# Altium footprint library SamacSys.PcbLib: 1008 footprints (part 48 of 63)
Each footprint in its own frame and in the unit in brackets; x right, y up, seen from the top. Pads: shape width x height; smd on the part's side, far side on the other; paste and mask are expansions set on the pad; w line width, h text height; cw(c..) or ccw(c..) is an arc to the next point about the centre after c.
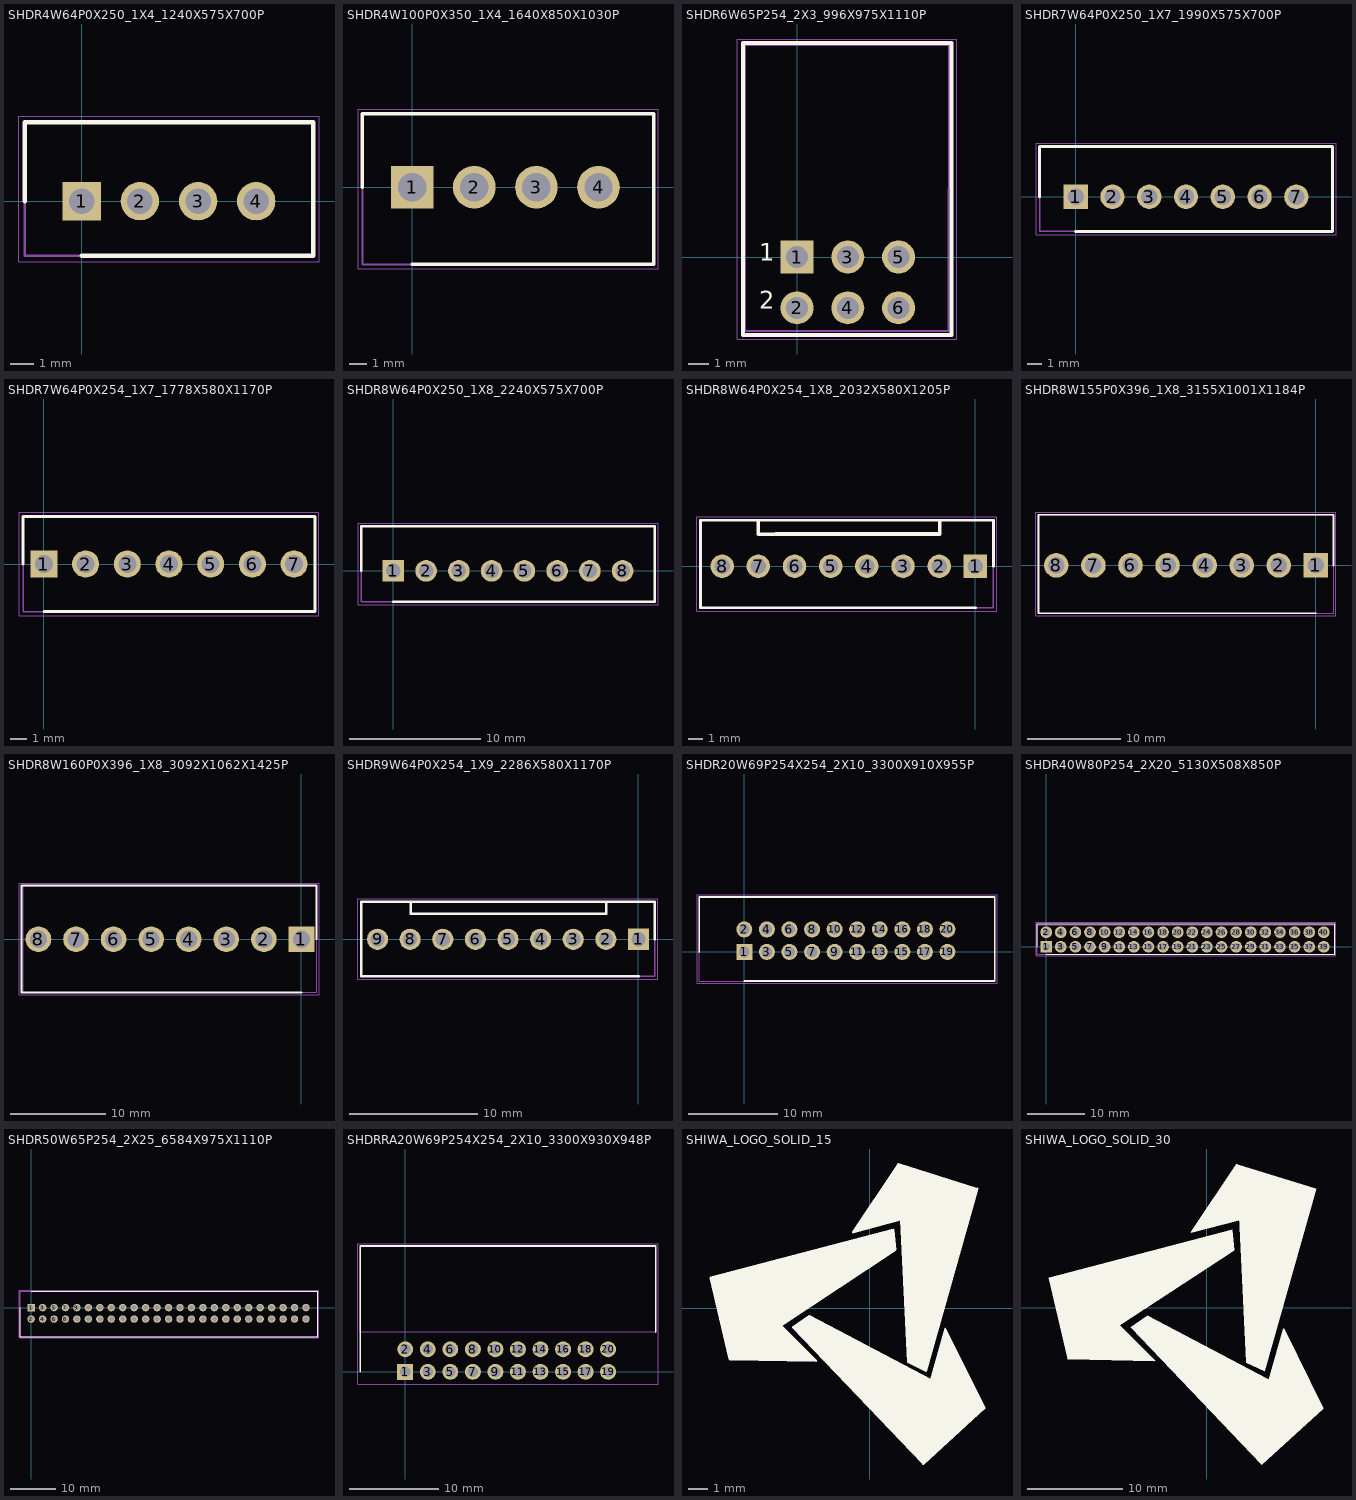
[diagram p47: the footprints below, top view; thin cyan lines are the x and y axes]

## SHDR4W64P0X250_1X4_1240X575X700P [mm]
pads (4):
  rect 1.65x1.65 hole 1.1: 1(0,0)
  round 1.65 hole 1.1: 2(2.5,0) 3(5,0) 4(7.5,0)
Top Overlay:
  lines w0.2: -2.45,0 -2.45,3.4 9.95,3.4 9.95,-2.35 0,-2.35
Assembly:
  lines w0.1: -2.45,-2.35 9.95,-2.35 9.95,3.4 -2.45,3.4 -2.45,-2.35
Countryard:
  lines w0.05: -2.7,-2.6 10.2,-2.6 10.2,3.65 -2.7,3.65 -2.7,-2.6
3D body "B4B-XH-A__LF__SN_.stp": height 7, standoff -3.4, extent -2.45,-2.875 9.95,2.875

## SHDR4W100P0X350_1X4_1640X850X1030P [mm]
pads (4):
  rect 2.4x2.4 hole 1.6: 1(0,0)
  round 2.4 hole 1.6: 2(3.5,0) 3(7,0) 4(10.5,0)
Top Overlay:
  lines w0.2: -2.8,0 -2.8,4.15 13.6,4.15 13.6,-4.35 0,-4.35
Assembly:
  lines w0.1: -2.8,-4.35 13.6,-4.35 13.6,4.15 -2.8,4.15 -2.8,-4.35
Countryard:
  lines w0.05: -3.05,-4.6 13.85,-4.6 13.85,4.4 -3.05,4.4 -3.05,-4.6
3D body "734-134.stp": height 10.3, standoff -4.5, extent -2.95,-4.25 13.45,4.25

## SHDR6W65P254_2X3_996X975X1110P [mm]
pads (6):
  rect 1.65x1.65 hole 1.1: 1(0,0)
  round 1.65 hole 1.1: 2(0,-2.54) 3(2.54,0) 4(2.54,-2.54) 5(5.08,0) 6(5.08,-2.54)
Top Overlay:
  lines w0.2: 7.7,10.7 -2.7,10.7 -2.7,-3.9 7.72,-3.9 7.72,10.7
  text "2" at -1.9,-2.9 h1.5
  text "1" at -1.9,-0.5 h1.5
Assembly:
  lines w0.1: 7.6,10.6 -2.6,10.6 -2.6,-3.7 7.567,-3.7 7.601,10.6
Countryard:
  lines w0.05: -3,-4.1 8,-4.1 8,10.9 -3,10.9 -3,-4.1
3D body "90130-3106.stp": height 9.75, standoff -2.9, extent -2.52,-2.893 7.44,10.51

## SHDR7W64P0X250_1X7_1990X575X700P [mm]
pads (7):
  rect 1.65x1.65 hole 1.1: 1(0,0)
  round 1.65 hole 1.1: 2(2.5,0) 3(5,0) 4(7.5,0) 5(10,0) 6(12.5,0) 7(15,0)
Top Overlay:
  lines w0.2: -2.45,0 -2.45,3.4 17.45,3.4 17.45,-2.35 0,-2.35
Assembly:
  lines w0.1: -2.45,-2.35 -2.45,3.4 17.45,3.4 17.45,-2.35 -2.45,-2.35
Countryard:
  lines w0.05: -2.7,-2.6 -2.7,3.65 17.7,3.65 17.7,-2.6 -2.7,-2.6
3D body "B7B-XH-A_LF__SN_.stp": height 7, standoff -3.4, extent -2.449,-2.349 17.451,3.401

## SHDR7W64P0X254_1X7_1778X580X1170P [mm]
pads (7):
  rect 1.65x1.65 hole 1.1: 1(0,0)
  round 1.65 hole 1.1: 2(2.54,0) 3(5.08,0) 4(7.62,0) 5(10.16,0) 6(12.7,0) 7(15.24,0)
Top Overlay:
  lines w0.2: -1.27,0 -1.27,2.9 16.51,2.9 16.51,-2.9 0,-2.9
Assembly:
  lines w0.1: -1.27,-2.9 -1.27,2.9 16.51,2.9 16.51,-2.9 -1.27,-2.9
Countryard:
  lines w0.05: -1.52,-3.15 -1.52,3.15 16.76,3.15 16.76,-3.15 -1.52,-3.15
3D body "22-27-2071.stp": height 11.7, standoff -3.56, extent -1.27,-2.9 16.51,2.9

## SHDR8W64P0X250_1X8_2240X575X700P [mm]
pads (8):
  rect 1.65x1.65 hole 1.1: 1(0,0)
  round 1.65 hole 1.1: 2(2.5,0) 3(5,0) 4(7.5,0) 5(10,0) 6(12.5,0) 7(15,0) 8(17.5,0)
Top Overlay:
  lines w0.2: -2.45,0 -2.45,3.4 19.95,3.4 19.95,-2.35 0,-2.35
Assembly:
  lines w0.1: -2.45,-2.35 -2.45,3.4 19.95,3.4 19.95,-2.35 -2.45,-2.35
Countryard:
  lines w0.05: -2.7,-2.6 -2.7,3.65 20.2,3.65 20.2,-2.6 -2.7,-2.6
3D body "DS1069-8.stp": height 7, standoff -3.4, extent -2.45,-2.875 19.95,2.875

## SHDR8W64P0X254_1X8_2032X580X1205P [mm]
pads (8):
  rect 1.65x1.65 hole 1.1: 1(0,0)
  round 1.65 hole 1.1: 2(-2.54,0) 3(-5.08,0) 4(-7.62,0) 5(-10.16,0) 6(-12.7,0) 7(-15.24,0) 8(-17.78,0)
Top Overlay:
  lines w0.2: 0,-2.92 -19.3,-2.92 -19.3,3.23 1.27,3.23 1.27,0
  lines w0.25: -15.25,3.15 -15.25,2.25 -14,2.25 -14.011,2.261 -2.511,2.261 ; -2.511,3.105 -2.511,2.261 ; -2.502,2.27 -2.511,2.261
Assembly:
  lines w0.1: -19.3,-2.92 1.27,-2.92 1.27,3.23 -19.3,3.23 -19.3,-2.92
Countryard:
  lines w0.05: -19.55,-3.17 1.52,-3.17 1.52,3.48 -19.55,3.48 -19.55,-3.17
3D body "22-27-2081.stp": height 11.7, standoff -3.56, extent -19.17,-2.75 1.15,3.05

## SHDR8W155P0X396_1X8_3155X1001X1184P [mm]
pads (8):
  rect 2.625x2.625 hole 1.75: 1(0,0)
  round 2.625 hole 1.75: 2(-3.96,0) 3(-7.92,0) 4(-11.88,0) 5(-15.84,0) 6(-19.8,0) 7(-23.76,0) 8(-27.72,0)
Top Overlay:
  lines w0.2: 0,-5.11 -29.645,-5.11 -29.645,5.41 1.905,5.41 1.905,0
Assembly:
  lines w0.1: -29.645,-5.11 -29.645,5.41 1.905,5.41 1.905,-5.11 -29.645,-5.11
Countryard:
  lines w0.05: -29.895,-5.36 -29.895,5.66 2.155,5.66 2.155,-5.36 -29.895,-5.36
3D body "26-60-4080.stp": height 14.65, standoff -3.64, extent -29.643,-5.083 1.903,4.924

## SHDR8W160P0X396_1X8_3092X1062X1425P [mm]
pads (8):
  rect 2.7x2.7 hole 1.8: 1(0,0)
  round 2.7 hole 1.8: 2(-3.96,0) 3(-7.92,0) 4(-11.88,0) 5(-15.84,0) 6(-19.8,0) 7(-23.76,0) 8(-27.72,0)
Top Overlay:
  lines w0.2: 0,-5.6 -29.52,-5.6 -29.52,5.65 1.6,5.65 1.6,0
Assembly:
  lines w0.1: -29.32,-5.6 -29.32,5.65 1.6,5.65 1.6,-5.6 -29.32,-5.6
Countryard:
  lines w0.05: -29.77,-5.85 -29.77,5.9 1.85,5.9 1.85,-5.85 -29.77,-5.85
3D body "09-65-2088.stp": height 13.85, standoff -3.6, extent -29.42,-5.35 1.5,5.4

## SHDR9W64P0X254_1X9_2286X580X1170P [mm]
pads (9):
  rect 1.65x1.65 hole 1.1: 1(0,0)
  round 1.65 hole 1.1: 2(-2.54,0) 3(-5.08,0) 4(-7.62,0) 5(-10.16,0) 6(-12.7,0) 7(-15.24,0) 8(-17.78,0) 9(-20.32,0)
Top Overlay:
  lines w0.2: -17.744,2.92 -17.744,2 -2.75,2 -2.506,2 -2.506,2.92 ; 0,-2.88 -21.59,-2.88 -21.59,2.92 1.27,2.92 1.27,0
Assembly:
  lines w0.1: -21.59,-2.88 -21.59,2.92 1.27,2.92 1.27,-2.88 -21.59,-2.88
Countryard:
  lines w0.05: -21.84,-3.13 -21.84,3.17 1.52,3.17 1.52,-3.13 -21.84,-3.13
3D body "22-27-2091.stp": height 11.7, standoff -3.56, extent -21.59,-2.88 1.27,2.92

## SHDR20W69P254X254_2X10_3300X910X955P [mm]
pads (20):
  rect 1.8x1.8 hole 1.2: 1(0,0)
  round 1.8 hole 1.2: 2(0,2.54) 3(2.54,0) 4(2.54,2.54) 5(5.08,0) 6(5.08,2.54) 7(7.62,0) 8(7.62,2.54) 9(10.16,0) 10(10.16,2.54) 11(12.7,0) 12(12.7,2.54) 13(15.24,0) 14(15.24,2.54) 15(17.78,0) 16(17.78,2.54) 17(20.32,0) 18(20.32,2.54) 19(22.86,0) 20(22.86,2.54)
Top Overlay:
  lines w0.2: -5.07,0 -5.07,6.2 28.18,6.2 28.18,-3.28 0,-3.28
Assembly:
  lines w0.1: -5.07,-3.28 28.18,-3.28 28.18,6.2 -5.07,6.2 -5.07,-3.28
Countryard:
  lines w0.05: -5.32,-3.53 28.43,-3.53 28.43,6.45 -5.32,6.45 -5.32,-3.53
3D body "DS1013-20SSIB1-B-0.stp": height 9.55, standoff -3.35, extent -5.07,-3.28 27.93,5.82

## SHDR40W80P254_2X20_5130X508X850P [mm]
pads (40):
  rect 2.025x2.025 hole 1.35: 1(0,0)
  round 2.025 hole 1.35: 2(0,2.54) 3(2.54,0) 4(2.54,2.54) 5(5.08,0) 6(5.08,2.54) 7(7.62,0) 8(7.62,2.54) 9(10.16,0) 10(10.16,2.54) 11(12.7,0) 12(12.7,2.54) 13(15.24,0) 14(15.24,2.54) 15(17.78,0) 16(17.78,2.54) 17(20.32,0) 18(20.32,2.54) 19(22.86,0) 20(22.86,2.54) 21(25.4,0) 22(25.4,2.54) 23(27.94,0) 24(27.94,2.54) 25(30.48,0) 26(30.48,2.54) 27(33.02,0) 28(33.02,2.54) 29(35.56,0) 30(35.56,2.54) 31(38.1,0) 32(38.1,2.54) 33(40.64,0) 34(40.64,2.54) 35(43.18,0) 36(43.18,2.54) 37(45.72,0) 38(45.72,2.54) 39(48.26,0) 40(48.26,2.54)
Top Overlay:
  lines w0.2: -1.52,0 -1.52,3.995 50.13,3.995 50.13,-1.27 0,-1.27
Assembly:
  lines w0.1: -1.52,-1.27 -1.52,3.81 50.13,3.81 50.13,-1.27 -1.52,-1.27
Countryard:
  lines w0.05: -1.77,-1.52 -1.77,4.245 50.38,4.245 50.38,-1.52 -1.77,-1.52
3D body "PPTC202LFBN-RC.step": height 8.51, standoff -3.2, extent -1.524,-1.27 49.784,3.81

## SHDR50W65P254_2X25_6584X975X1110P [mm]
pads (50):
  rect 1.65x1.65 hole 1.1: 1(0,0)
  round 1.65 hole 1.1: 2(0,-2.54) 3(2.54,0) 4(2.54,-2.54) 5(5.08,0) 6(5.08,-2.54) 7(7.62,0) 8(7.62,-2.54) 9(10.16,0) 10(10.16,-2.54) 11(12.7,0) 12(12.7,-2.54) 13(15.24,0) 14(15.24,-2.54) 15(17.78,0) 16(17.78,-2.54) 17(20.32,0) 18(20.32,-2.54) 19(22.86,0) 20(22.86,-2.54) 21(25.4,0) 22(25.4,-2.54) 23(27.94,0) 24(27.94,-2.54) 25(30.48,0) 26(30.48,-2.54) 27(33.02,0) 28(33.02,-2.54) 29(35.56,0) 30(35.56,-2.54) 31(38.1,0) 32(38.1,-2.54) 33(40.64,0) 34(40.64,-2.54) 35(43.18,0) 36(43.18,-2.54) 37(45.72,0) 38(45.72,-2.54) 39(48.26,0) 40(48.26,-2.54) 41(50.8,0) 42(50.8,-2.54) 43(53.34,0) 44(53.34,-2.54) 45(55.88,0) 46(55.88,-2.54) 47(58.42,0) 48(58.42,-2.54) 49(60.96,0) 50(60.96,-2.54)
Top Overlay:
  lines w0.2: -2.44,0 -2.44,-6.445 63.6,-6.445 63.6,3.605 0,3.605
Assembly:
  lines w0.1: -2.44,-6.445 -2.44,3.605 63.6,3.605 63.6,-6.445 -2.44,-6.445
Countryard:
  lines w0.05: -2.69,-6.695 -2.69,3.855 63.85,3.855 63.85,-6.695 -2.69,-6.695
3D body "90130-1150.stp": height 11.1, standoff -3.2, extent -2.44,-6.145 63.4,3.605

## SHDRRA20W69P254X254_2X10_3300X930X948P [mm]
pads (20):
  rect 1.8x1.8 hole 1.2: 1(0,0)
  round 1.8 hole 1.2: 2(0,2.54) 3(2.54,0) 4(2.54,2.54) 5(5.08,0) 6(5.08,2.54) 7(7.62,0) 8(7.62,2.54) 9(10.16,0) 10(10.16,2.54) 11(12.7,0) 12(12.7,2.54) 13(15.24,0) 14(15.24,2.54) 15(17.78,0) 16(17.78,2.54) 17(20.32,0) 18(20.32,2.54) 19(22.86,0) 20(22.86,2.54)
Top Overlay:
  lines w0.2: -5.07,0 -5.07,14.18 28.23,14.18 28.23,4.5
Assembly:
  lines w0.1: -5.07,4.5 28.23,4.5 28.23,14.18 -5.07,14.18 -5.07,4.5
Countryard:
  lines w0.05: -5.32,-1.4 -5.32,14.43 28.48,14.43 28.48,-1.4 -5.32,-1.4
3D body "DS1013-20RSIB.stp": height 9.48, standoff -3.28, extent -5.07,-0.345 27.93,13.8

## SHIWA_LOGO_SOLID_15 [mm]
Top Overlay:
  region: -7.344,-2.746 -2.812,-2.82 -2.775,-2.734 -4.594,-0.915 1.376,3.011 1.398,3.058 1.299,4.122 1.236,4.166 -8.38,1.637 -8.416,1.577
  region: -0.881,3.984 1.515,7.578 5.674,6.28 2.979,-3.302 2.014,-2.837 1.648,4.65
  region: 2.812,-8.193 -4.042,-1.007 -3.177,-0.408 3.212,-3.768 3.977,-1.073 6.04,-5.265
  lines w0.1: -7.369,-2.67 -8.367,1.589 1.249,4.117 1.348,3.053 -4.674,-0.907 -2.811,-2.77 -7.343,-2.696 ; 1.648,4.65 -0.881,3.984 1.515,7.578 5.674,6.28 2.979,-3.302 2.014,-2.837 1.648,4.65 ; -4.042,-1.007 -3.177,-0.408 3.212,-3.768 3.977,-1.073 6.04,-5.265 2.812,-8.193 -4.042,-1.007

## SHIWA_LOGO_SOLID_30 [mm]
Top Overlay:
  region: 4.178,-5.723 3.18,15.105 11.497,12.51 6.107,-6.655
  region: -14.588,-5.39 -16.584,3.127 2.647,8.185 2.847,6.055
  region: 5.775,-16.437 -7.933,-2.063 -6.203,-0.865 12.229,-10.581
  region: 6.575,-7.6 12.225,-10.575 8.104,-2.196
  region: -1.612,7.918 3.175,15.1 3.45,9.25
  region: -14.575,-5.375 -5.471,-5.59 -9.2,-1.85
  lines w0.1: -16.584,3.127 2.647,8.185 2.847,6.055 -14.588,-5.39 -16.584,3.127 ; -14.575,-5.375 -5.471,-5.59 -9.2,-1.85 -14.575,-5.375 ; -7.933,-2.063 5.775,-16.437 12.229,-10.581 -6.203,-0.865 -7.933,-2.063 ; -1.612,7.918 3.45,9.25 3.175,15.1 -1.612,7.918 ; 3.18,15.105 4.178,-5.723 6.107,-6.655 11.497,12.51 3.18,15.105 ; 6.575,-7.6 12.225,-10.575 8.104,-2.196 6.575,-7.6